# Altium schematic symbol library Vibration_Datalogger.SchLib: 75 symbols (part 2 of 7)
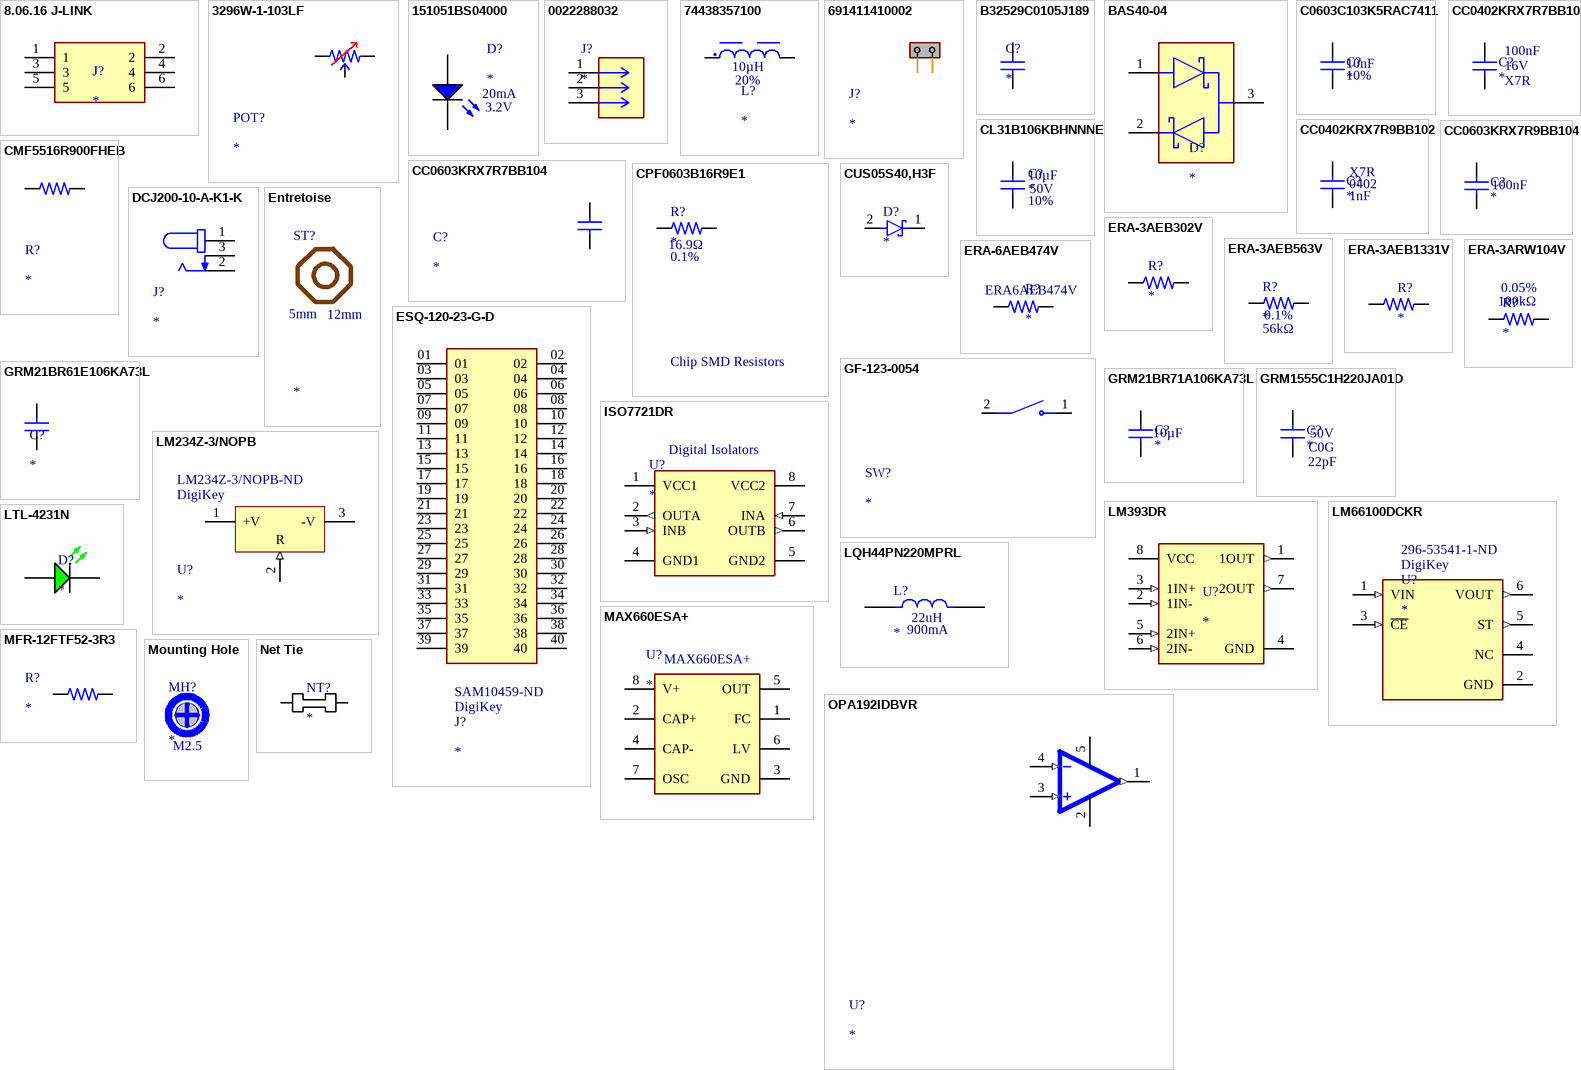
[diagram p2: symbols 8.06.16 J-LINK to OPA192IDBVR]

## CC0603KRX7R7BB104
designator C?
CAP CER 0.1UF 16V X7R 0603; Manufacturer: Yageo Group; Manufacturer Part Number: CC0603KRX7R7BB104; Capacitance: 100nF; Dielectric Material: Ceramic; Insulation Resistance: 100GΩ; Tolerance: 10%; Case/Package: 0603; Case Code (Imperial): 0603; Case Code (Metric): 1608; China RoHS: Compliant; Composition: Ceramic; Depth: 800µm; Dielectric: X7R; Halogen Free: Halogen Free; Height: 800µm; Lead Free: Lead Free; Length: 1.6mm; Lifecycle Status: Production; Material: Ceramic; Max Operating Temperature: 125°C; Min Operating Temperature: -55°C; Mount: Surface Mount; Number of Pins: 2; Number of Terminals: 2; Radiation Hardening: No; REACH SVHC: Yes; Schedule B: 8532240020, 8532240020|8532240020, 8532240020|8532240020|8532240020, 8532240020|8532240020|8532240020|8532240020; Termination: SMD/SMT; Thickness: 889µm; Voltage: 16V; Voltage Rating: 16V; Voltage Rating (DC): 16V; Width: 800µm; ComponentLink1URL: https://datasheet.octopart.com:443/CC0603KRX7R7BB104-Yageo-datasheet-177165144.pdf?src-supplier=IHS; ComponentLink1Description: https://datasheet.octopart.com:443/CC0603KRX7R7BB104-Yageo-datasheet-177165144.pdf?src-supplier=IHS; ComponentLink2URL: https://datasheet.octopart.com:443/CC0603KRX7R7BB104-Yageo-datasheet-82288757.pdf?src-supplier=Upverter; ComponentLink2Description: https://datasheet.octopart.com:443/CC0603KRX7R7BB104-Yageo-datasheet-82288757.pdf?src-supplier=Upverter; ComponentLink3URL: https://datasheet.octopart.com:443/CC0603KRX7R7BB104-Yageo-Group-datasheet-189192896.pdf?src-supplier=Future+Electronics; ComponentLink3Description: https://datasheet.octopart.com:443/CC0603KRX7R7BB104-Yageo-Group-datasheet-189192896.pdf?src-supplier=Future+Electronics; ComponentLink4URL: https://datasheet.octopart.com:443/CC0603KRX7R7BB104-Yageo-datasheet-166511530.pdf?src-supplier=Future+Electronics; ComponentLink4Description: https://datasheet.octopart.com:443/CC0603KRX7R7BB104-Yageo-datasheet-166511530.pdf?src-supplier=Future+Electronics; ComponentLink5URL: https://datasheet.octopart.com:443/CC0603KRX7R7BB104-Yageo-datasheet-137700082.pdf?src-supplier=Future+Electronics; ComponentLink5Description: https://datasheet.octopart.com:443/CC0603KRX7R7BB104-Yageo-datasheet-137700082.pdf?src-supplier=Future+Electronics; ComponentLink6URL: https://datasheet.octopart.com:443/CC0603KRX7R7BB104-Yageo-datasheet-137700084.pdf?src-supplier=Future+Electronics; ComponentLink6Description: https://datasheet.octopart.com:443/CC0603KRX7R7BB104-Yageo-datasheet-137700084.pdf?src-supplier=Future+Electronics; ComponentLink7URL: https://datasheet.octopart.com:443/CC0603KRX7R7BB104-Yageo-datasheet-27626582.pdf?src-supplier=Future+Electronics; ComponentLink7Description: https://datasheet.octopart.com:443/CC0603KRX7R7BB104-Yageo-datasheet-27626582.pdf?src-supplier=Future+Electronics; ComponentLink8URL: https://datasheet.octopart.com:443/CC0603KRX7R7BB104-Yageo-datasheet-12526321.pdf?src-supplier=Future+Electronics; ComponentLink8Description: https://datasheet.octopart.com:443/CC0603KRX7R7BB104-Yageo-datasheet-12526321.pdf?src-supplier=Future+Electronics; ComponentLink9URL: https://datasheet.octopart.com:443/CC0603KRX7R7BB104-Yageo-datasheet-10911834.pdf?src-supplier=Future+Electronics; ComponentLink9Description: https://datasheet.octopart.com:443/CC0603KRX7R7BB104-Yageo-datasheet-10911834.pdf?src-supplier=Future+Electronics; ComponentLink10URL: https://datasheet.octopart.com:443/CC0603KRX7R7BB104-Yageo-datasheet-8324442.pdf?src-supplier=Future+Electronics; ComponentLink10Description: https://datasheet.octopart.com:443/CC0603KRX7R7BB104-Yageo-datasheet-8324442.pdf?src-supplier=Future+Electronics; ComponentLink11URL: https://datasheet.octopart.com/CC0603KRX7R7BB104-Yageo-datasheet-10883670.pdf; ComponentLink11Description: https://datasheet.octopart.com/CC0603KRX7R7BB104-Yageo-datasheet-10883670.pdf; ComponentLink12URL: https://datasheet.octopart.com:443/CC0603KRX7R7BB104-Yageo-datasheet-181968638.pdf?src-supplier=Newark; ComponentLink12Description: https://datasheet.octopart.com:443/CC0603KRX7R7BB104-Yageo-datasheet-181968638.pdf?src-supplier=Newark; ComponentLink13URL: https://datasheet.octopart.com:443/CC0603KRX7R7BB104-Phycomp-datasheet-499490.pdf?src-supplier=Newark; ComponentLink13Description: https://datasheet.octopart.com:443/CC0603KRX7R7BB104-Phycomp-datasheet-499490.pdf?src-supplier=Newark; ComponentLink14URL: https://datasheet.octopart.com:443/CC0603KRX7R7BB104-Yageo-datasheet-62336348.pdf?src-supplier=Newark; ComponentLink14Description: https://datasheet.octopart.com:443/CC0603KRX7R7BB104-Yageo-datasheet-62336348.pdf?src-supplier=Newark; ComponentLink15URL: https://datasheet.octopart.com:443/CC0603KRX7R7BB104-Yageo-datasheet-15895757.pdf?src-supplier=Newark; ComponentLink15Description: https://datasheet.octopart.com:443/CC0603KRX7R7BB104-Yageo-datasheet-15895757.pdf?src-supplier=Newark; ComponentLink16URL: https://datasheet.octopart.com:443/CC0603KRX7R7BB104-Yageo-datasheet-182050803.pdf?src-supplier=Newark; ComponentLink16Description: https://datasheet.octopart.com:443/CC0603KRX7R7BB104-Yageo-datasheet-182050803.pdf?src-supplier=Newark; ComponentLink17URL: https://datasheet.octopart.com:443/CC0603KRX7R7BB104-Yageo-datasheet-151948686.pdf?src-supplier=Farnell; ComponentLink17Description: https://datasheet.octopart.com:443/CC0603KRX7R7BB104-Yageo-datasheet-151948686.pdf?src-supplier=Farnell; ComponentLink18URL: https://datasheet.octopart.com:443/CC0603KRX7R7BB104-Phycomp-datasheet-500777.pdf?src-supplier=Farnell; ComponentLink18Description: https://datasheet.octopart.com:443/CC0603KRX7R7BB104-Phycomp-datasheet-500777.pdf?src-supplier=Farnell; ComponentLink19URL: https://datasheet.octopart.com:443/CC0603KRX7R7BB104-Phycomp-datasheet-519481.pdf?src-supplier=element14; ComponentLink19Description: https://datasheet.octopart.com:443/CC0603KRX7R7BB104-Phycomp-datasheet-519481.pdf?src-supplier=element14; ComponentLink20URL: https://datasheet.octopart.com:443/CC0603KRX7R7BB104-Yageo-datasheet-8701427.pdf?src-supplier=element14; ComponentLink20Description: https://datasheet.octopart.com:443/CC0603KRX7R7BB104-Yageo-datasheet-8701427.pdf?src-supplier=element14; ComponentLink21URL: https://datasheet.octopart.com:443/CC0603KRX7R7BB104-Yageo-datasheet-5301394.pdf?src-supplier=element14; ComponentLink21Description: https://datasheet.octopart.com:443/CC0603KRX7R7BB104-Yageo-datasheet-5301394.pdf?src-supplier=element14; ComponentLink22URL: https://datasheet.octopart.com:443/CC0603KRX7R7BB104-Yageo-Group-datasheet-165992755.pdf?src-supplier=ODG+(Origin+Data+Global); ComponentLink22Description: https://datasheet.octopart.com:443/CC0603KRX7R7BB104-Yageo-Group-datasheet-165992755.pdf?src-supplier=ODG+(Origin+Data+Global); ComponentLink23URL: https://datasheet.octopart.com:443/CC0603KRX7R7BB104-Yageo-datasheet-140260305.pdf?src-supplier=SOS+electronic; ComponentLink23Description: https://datasheet.octopart.com:443/CC0603KRX7R7BB104-Yageo-datasheet-140260305.pdf?src-supplier=SOS+electronic; ComponentLink24URL: https://datasheet.octopart.com:443/CC0603KRX7R7BB104-Yageo-datasheet-178018956.pdf?src-supplier=Burklin+Elektronik; ComponentLink24Description: https://datasheet.octopart.com:443/CC0603KRX7R7BB104-Yageo-datasheet-178018956.pdf?src-supplier=Burklin+Elektronik; ComponentLink25URL: https://datasheet.octopart.com:443/CC0603KRX7R7BB104-Yageo-datasheet-17600895.pdf?src-supplier=TME; ComponentLink25Description: https://datasheet.octopart.com:443/CC0603KRX7R7BB104-Yageo-datasheet-17600895.pdf?src-supplier=TME; ComponentLink26URL: https://datasheet.octopart.com:443/CC0603KRX7R7BB104-Yageo-datasheet-118396.pdf?src-supplier=DigiKey; ComponentLink26Description: https://datasheet.octopart.com:443/CC0603KRX7R7BB104-Yageo-datasheet-118396.pdf?src-supplier=DigiKey; ComponentLink27URL: http://sigma.octopart.com:80/conflict_mineral_statement/Yageo-company-3.pdf?src-supplier=Compliance+Statements; ComponentLink27Description: http://sigma.octopart.com:80/conflict_mineral_statement/Yageo-company-3.pdf?src-supplier=Compliance+Statements; ComponentLink28URL: http://sigma.octopart.com:80/rohs_statement/Yageo-company-2.pdf?src-supplier=Compliance+Statements; ComponentLink28Description: http://sigma.octopart.com:80/rohs_statement/Yageo-company-2.pdf?src-supplier=Compliance+Statements; Supplier 1: DigiKey; Supplier Part Number 1: 311-1088-1-ND; Category: Ceramic Capacitors
footprint CC0603KRX7R7BB104 (CAP CER 0.1UF 16V X7R 0603)
pins: 1 P, 2 N

## CC0603KRX7R9BB104
designator C?  Capacitance: 100nF
CAP CER 0.1UF 50V X7R 0603; Dielectric Material: Ceramic; Tolerance: 10%; Case/Package: 0603; Case Code (Imperial): 0603; Case Code (Metric): 1608; China RoHS: Compliant; Country of Origin: Mainland China, Taiwan; Depth: 800µm; Dielectric: X7R; Export Control Classification Number (ECCN) Code: EAR99; Halogen Free: Halogen Free; Height: 800µm; Harmonized Tariff Schedule (HTS) Code: 8532.24.00.20; Introduction Date: 2005-08-18; Lead Free: Lead Free; Length: 1.6mm; Lifecycle Status: Production; Material: Ceramic; Max Operating Temperature: 125°C; Min Operating Temperature: -55°C; Mount: Surface Mount; Number of Pins: 2; Number of Terminals: 2; Radiation Hardening: No; REACH SVHC: Yes; Schedule B: 8532240020, 8532240020|8532240020, 8532240020|8532240020|8532240020, 8532240020|8532240020|8532240020|8532240020; Termination: SMD/SMT; Thickness: 889µm; Voltage: 50V; Voltage Rating: 50V; Voltage Rating (DC): 50V; Width: 800µm; ComponentLink1URL: https://datasheet.octopart.com:443/CC0603KRX7R9BB104-Yageo-datasheet-177165144.pdf?src-supplier=IHS; ComponentLink1Description: https://datasheet.octopart.com:443/CC0603KRX7R9BB104-Yageo-datasheet-177165144.pdf?src-supplier=IHS; ComponentLink2URL: https://datasheet.octopart.com:443/CC0603KRX7R9BB104-Yageo-datasheet-82288757.pdf?src-supplier=Upverter; ComponentLink2Description: https://datasheet.octopart.com:443/CC0603KRX7R9BB104-Yageo-datasheet-82288757.pdf?src-supplier=Upverter; ComponentLink3URL: https://datasheet.octopart.com:443/CC0603KRX7R9BB104-Yageo-datasheet-68298032.pdf?src-supplier=Upverter; ComponentLink3Description: https://datasheet.octopart.com:443/CC0603KRX7R9BB104-Yageo-datasheet-68298032.pdf?src-supplier=Upverter; ComponentLink4URL: https://datasheet.octopart.com:443/CC0603KRX7R9BB104-Yageo-Group-datasheet-189192896.pdf?src-supplier=Future+Electronics; ComponentLink4Description: https://datasheet.octopart.com:443/CC0603KRX7R9BB104-Yageo-Group-datasheet-189192896.pdf?src-supplier=Future+Electronics; ComponentLink5URL: https://datasheet.octopart.com:443/CC0603KRX7R9BB104-Yageo-datasheet-166511530.pdf?src-supplier=Future+Electronics; ComponentLink5Description: https://datasheet.octopart.com:443/CC0603KRX7R9BB104-Yageo-datasheet-166511530.pdf?src-supplier=Future+Electronics; ComponentLink6URL: https://datasheet.octopart.com:443/CC0603KRX7R9BB104-Yageo-datasheet-137700082.pdf?src-supplier=Future+Electronics; ComponentLink6Description: https://datasheet.octopart.com:443/CC0603KRX7R9BB104-Yageo-datasheet-137700082.pdf?src-supplier=Future+Electronics; ComponentLink7URL: https://datasheet.octopart.com:443/CC0603KRX7R9BB104-Yageo-datasheet-137700084.pdf?src-supplier=Future+Electronics; ComponentLink7Description: https://datasheet.octopart.com:443/CC0603KRX7R9BB104-Yageo-datasheet-137700084.pdf?src-supplier=Future+Electronics; ComponentLink8URL: https://datasheet.octopart.com:443/CC0603KRX7R9BB104-Yageo-datasheet-27626582.pdf?src-supplier=Future+Electronics; ComponentLink8Description: https://datasheet.octopart.com:443/CC0603KRX7R9BB104-Yageo-datasheet-27626582.pdf?src-supplier=Future+Electronics; ComponentLink9URL: https://datasheet.octopart.com:443/CC0603KRX7R9BB104-Yageo-datasheet-15895757.pdf?src-supplier=Future+Electronics; ComponentLink9Description: https://datasheet.octopart.com:443/CC0603KRX7R9BB104-Yageo-datasheet-15895757.pdf?src-supplier=Future+Electronics; ComponentLink10URL: https://datasheet.octopart.com:443/CC0603KRX7R9BB104-Yageo-datasheet-8324192.pdf?src-supplier=Future+Electronics; ComponentLink10Description: https://datasheet.octopart.com:443/CC0603KRX7R9BB104-Yageo-datasheet-8324192.pdf?src-supplier=Future+Electronics; ComponentLink11URL: https://datasheet.octopart.com/CC0603KRX7R9BB104-Yageo-datasheet-10883670.pdf; ComponentLink11Description: https://datasheet.octopart.com/CC0603KRX7R9BB104-Yageo-datasheet-10883670.pdf; ComponentLink12URL: https://datasheet.octopart.com/CC0603KRX7R9BB104-Yageo-datasheet-12526321.pdf; ComponentLink12Description: https://datasheet.octopart.com/CC0603KRX7R9BB104-Yageo-datasheet-12526321.pdf; ComponentLink13URL: https://datasheet.octopart.com:443/CC0603KRX7R9BB104-Yageo-datasheet-181968726.pdf?src-supplier=Newark; ComponentLink13Description: https://datasheet.octopart.com:443/CC0603KRX7R9BB104-Yageo-datasheet-181968726.pdf?src-supplier=Newark; ComponentLink14URL: https://datasheet.octopart.com:443/CC0603KRX7R9BB104-Yageo-datasheet-499490.pdf?src-supplier=Newark; ComponentLink14Description: https://datasheet.octopart.com:443/CC0603KRX7R9BB104-Yageo-datasheet-499490.pdf?src-supplier=Newark; ComponentLink15URL: https://datasheet.octopart.com:443/CC0603KRX7R9BB104-Yageo-datasheet-62336348.pdf?src-supplier=Newark; ComponentLink15Description: https://datasheet.octopart.com:443/CC0603KRX7R9BB104-Yageo-datasheet-62336348.pdf?src-supplier=Newark; ComponentLink16URL: https://datasheet.octopart.com:443/CC0603KRX7R9BB104-Yageo-datasheet-147453679.pdf?src-supplier=Newark; ComponentLink16Description: https://datasheet.octopart.com:443/CC0603KRX7R9BB104-Yageo-datasheet-147453679.pdf?src-supplier=Newark; ComponentLink17URL: https://datasheet.octopart.com:443/CC0603KRX7R9BB104-Yageo-datasheet-151948686.pdf?src-supplier=Farnell; ComponentLink17Description: https://datasheet.octopart.com:443/CC0603KRX7R9BB104-Yageo-datasheet-151948686.pdf?src-supplier=Farnell; ComponentLink18URL: https://datasheet.octopart.com:443/CC0603KRX7R9BB104-Yageo-datasheet-500777.pdf?src-supplier=Farnell; ComponentLink18Description: https://datasheet.octopart.com:443/CC0603KRX7R9BB104-Yageo-datasheet-500777.pdf?src-supplier=Farnell; ComponentLink19URL: https://datasheet.octopart.com:443/CC0603KRX7R9BB104-Yageo-datasheet-178019014.pdf?src-supplier=Burklin+Elektronik; ComponentLink19Description: https://datasheet.octopart.com:443/CC0603KRX7R9BB104-Yageo-datasheet-178019014.pdf?src-supplier=Burklin+Elektronik; ComponentLink20URL: https://datasheet.octopart.com:443/CC0603KRX7R9BB104-Yageo-Group-datasheet-165992755.pdf?src-supplier=ODG+(Origin+Data+Global); ComponentLink20Description: https://datasheet.octopart.com:443/CC0603KRX7R9BB104-Yageo-Group-datasheet-165992755.pdf?src-supplier=ODG+(Origin+Data+Global); ComponentLink21URL: https://datasheet.octopart.com:443/CC0603KRX7R9BB104-Yageo-datasheet-140260305.pdf?src-supplier=SOS+electronic; ComponentLink21Description: https://datasheet.octopart.com:443/CC0603KRX7R9BB104-Yageo-datasheet-140260305.pdf?src-supplier=SOS+electronic; ComponentLink22URL: https://datasheet.octopart.com:443/CC0603KRX7R9BB104-Yageo-datasheet-120101875.pdf?src-supplier=Megastar; ComponentLink22Description: https://datasheet.octopart.com:443/CC0603KRX7R9BB104-Yageo-datasheet-120101875.pdf?src-supplier=Megastar; ComponentLink23URL: https://datasheet.octopart.com:443/CC0603KRX7R9BB104-Yageo-datasheet-8701427.pdf?src-supplier=element14; ComponentLink23Description: https://datasheet.octopart.com:443/CC0603KRX7R9BB104-Yageo-datasheet-8701427.pdf?src-supplier=element14; ComponentLink24URL: https://datasheet.octopart.com:443/CC0603KRX7R9BB104-Yageo-datasheet-5301394.pdf?src-supplier=element14; ComponentLink24Description: https://datasheet.octopart.com:443/CC0603KRX7R9BB104-Yageo-datasheet-5301394.pdf?src-supplier=element14; ComponentLink25URL: https://datasheet.octopart.com:443/CC0603KRX7R9BB104-Yageo-datasheet-17600895.pdf?src-supplier=TME; ComponentLink25Description: https://datasheet.octopart.com:443/CC0603KRX7R9BB104-Yageo-datasheet-17600895.pdf?src-supplier=TME; ComponentLink26URL: http://sigma.octopart.com:80/15889575/rohs_statement/Yageo-CC0603KRX7R9BB104.pdf?src-supplier=Compliance+Statements; ComponentLink26Description: http://sigma.octopart.com:80/15889575/rohs_statement/Yageo-CC0603KRX7R9BB104.pdf?src-supplier=Compliance+Statements; ComponentLink27URL: http://sigma.octopart.com:80/rohs_statement/Surface-Mount-Ceramic-Multilayer-Capacitors%3B-General-Purpose-%26-High-Capacitance-Class-2%2C-X7R-Yageo-family-124.pdf?src-supplier=Compliance+Statements; ComponentLink27Description: http://sigma.octopart.com:80/rohs_statement/Surface-Mount-Ceramic-Multilayer-Capacitors%3B-General-Purpose-%26-High-Capacitance-Class-2%2C-X7R-Yageo-family-124.pdf?src-supplier=Compliance+Statements; ComponentLink28URL: http://sigma.octopart.com:80/reach_statement/Surface-Mount-Ceramic-Multilayer-Capacitors%3B-General-Purpose-%26-High-Capacitance-Class-2%2C-X7R-Yageo-family-125.pdf?src-supplier=Compliance+Statements; ComponentLink28Description: http://sigma.octopart.com:80/reach_statement/Surface-Mount-Ceramic-Multilayer-Capacitors%3B-General-Purpose-%26-High-Capacitance-Class-2%2C-X7R-Yageo-family-125.pdf?src-supplier=Compliance+Statements; ComponentLink29URL: http://sigma.octopart.com:80/conflict_mineral_statement/Yageo-company-3.pdf?src-supplier=Compliance+Statements; ComponentLink29Description: http://sigma.octopart.com:80/conflict_mineral_statement/Yageo-company-3.pdf?src-supplier=Compliance+Statements
footprint CC0603KRX7R7BB104 (CAP CER 0.1UF 16V X7R 0603)
pins: 1 P, 2 N

## CL31B106KBHNNNE
designator C?  Capacitance: 10µF  Voltage Rating: 50V  Tolerance: 10%
CAP CER 10UF 50V X7R 1206; Manufacturer: Cal-Chip Electronics; Manufacturer Part Number: GMC31X7R106M35NT; Dielectric Material: Ceramic; Case/Package: 1206; China RoHS: Compliant; Country of Origin: Slovenia, South Korea, Taiwan; Export Control Classification Number (ECCN) Code: EAR99; Height: 1.9mm; Harmonized Tariff Schedule (HTS) Code: 8532.24.00.20; Introduction Date: 2022-02-23; Length: 3.2mm; Lifecycle Status: Production; Max Operating Temperature: 125°C; Min Operating Temperature: -55°C; Mount: Surface Mount; Number of Terminals: 2; REACH SVHC: Yes; Width: 1.6mm; ComponentLink1URL: https://datasheet.octopart.com:443/GMC31X7R106M35NT-Cal-Chip-Electronics-datasheet-182028815.pdf?src-supplier=IHS; ComponentLink1Description: https://datasheet.octopart.com:443/GMC31X7R106M35NT-Cal-Chip-Electronics-datasheet-182028815.pdf?src-supplier=IHS; Supplier 1: DigiKey; Supplier Part Number 1: 4713-GMC31X7R106M35NTCT-ND; Category: Ceramic Capacitors; Case Code (Imperial): 1206; Case Code (Metric): 3216; Dielectric: X7R; Lead Free: Lead Free; Material: Ceramic; Packaging: Tape & Reel (TR); Schedule B: 8532240020, 8532240020|8532240020|8532240020|8532240020|8532240020; Thickness: 1.8034mm; ComponentLink2URL: https://datasheet.octopart.com:443/CL31B106KBHNNNE-Samsung-Electro-Mechanics-datasheet-137256395.pdf?src-supplier=Upverter; ComponentLink2Description: https://datasheet.octopart.com:443/CL31B106KBHNNNE-Samsung-Electro-Mechanics-datasheet-137256395.pdf?src-supplier=Upverter; ComponentLink3URL: https://datasheet.octopart.com:443/CL31B106KBHNNNE-Samsung-Electro-Mechanics-datasheet-149066874.pdf?src-supplier=Future+Electronics; ComponentLink3Description: https://datasheet.octopart.com:443/CL31B106KBHNNNE-Samsung-Electro-Mechanics-datasheet-149066874.pdf?src-supplier=Future+Electronics; ComponentLink4URL: https://datasheet.octopart.com:443/CL31B106KBHNNNE-Samsung-Electro-Mechanics-datasheet-67374631.pdf?src-supplier=Future+Electronics; ComponentLink4Description: https://datasheet.octopart.com:443/CL31B106KBHNNNE-Samsung-Electro-Mechanics-datasheet-67374631.pdf?src-supplier=Future+Electronics; ComponentLink5URL: https://datasheet.octopart.com:443/CL31B106KBHNNNE-Samsung-Electro-Mechanics-datasheet-136482622.pdf?src-supplier=Newark; ComponentLink5Description: https://datasheet.octopart.com:443/CL31B106KBHNNNE-Samsung-Electro-Mechanics-datasheet-136482622.pdf?src-supplier=Newark; ComponentLink6URL: https://datasheet.octopart.com/CL31B106KBHNNNE-Samsung-Electro-Mechanics-datasheet-97040617.pdf; ComponentLink6Description: https://datasheet.octopart.com/CL31B106KBHNNNE-Samsung-Electro-Mechanics-datasheet-97040617.pdf; ComponentLink7URL: https://datasheet.octopart.com/CL31B106KBHNNNE-Samsung-Electro-Mechanics-datasheet-8324245.pdf; ComponentLink7Description: https://datasheet.octopart.com/CL31B106KBHNNNE-Samsung-Electro-Mechanics-datasheet-8324245.pdf; ComponentLink8URL: https://datasheet.octopart.com:443/CL31B106KBHNNNE-Samsung-Electro-Mechanics-datasheet-110617700.pdf?src-supplier=LCSC; ComponentLink8Description: https://datasheet.octopart.com:443/CL31B106KBHNNNE-Samsung-Electro-Mechanics-datasheet-110617700.pdf?src-supplier=LCSC; ComponentLink9URL: https://datasheet.octopart.com:443/CL31B106KBHNNNE-Samsung-datasheet-59220082.pdf?src-supplier=TME; ComponentLink9Description: https://datasheet.octopart.com:443/CL31B106KBHNNNE-Samsung-datasheet-59220082.pdf?src-supplier=TME
footprint CL31B106KBHNNNE (CAP CER 10UF 50V X7R 1206)
pins: 1 P, 2 N

## CMF5516R900FHEB
designator R?
RES 16.9 OHM 1/2W 1% AXIAL; Lead Diameter: 600µm; Max Power Dissipation: 500mW; Resistance: 16.9Ω; Temperature Coefficient: 50ppm/°C; Voltage Rating (DC): 250V; Case/Package: Axial; China RoHS: Compliant; Composition: Metal Film; Contact Plating: Tin; Diameter: 2.29mm; Export Control Classification Number (ECCN) Code: EAR99; Features: Flame Retardant Coating, Moisture Resistant; Harmonized Tariff Schedule (HTS) Code: 8533.21.00.90; Introduction Date: 2005-12-02; Lead Free: Lead Free; Lifecycle Status: Production; Max Operating Temperature: 155°C; Min Operating Temperature: -55°C; Mount: Through Hole; Number of Terminals: 2; Number of Terminations: 2; Power Dissipation: 500mW; Radiation Hardening: No; REACH SVHC: No; Tolerance: 1%; Working Voltage: 250V; ComponentLink1URL: https://datasheet.octopart.com:443/CMF5516R900FHEB-Vishay-datasheet-154547024.pdf?src-supplier=IHS; ComponentLink1Description: https://datasheet.octopart.com:443/CMF5516R900FHEB-Vishay-datasheet-154547024.pdf?src-supplier=IHS; ComponentLink2URL: https://datasheet.octopart.com/Metal-Film-Resistors%2C-Industrial%2C-Precision-Vishay-datasheet-family-218.pdf; ComponentLink2Description: https://datasheet.octopart.com/Metal-Film-Resistors%2C-Industrial%2C-Precision-Vishay-datasheet-family-218.pdf; ComponentLink3URL: https://datasheet.octopart.com/CMF5516R900FHEB-Vishay-datasheet-13468232.pdf; ComponentLink3Description: https://datasheet.octopart.com/CMF5516R900FHEB-Vishay-datasheet-13468232.pdf; ComponentLink4URL: https://datasheet.octopart.com/CMF5516R900FHEB-Vishay-datasheet-13246561.pdf; ComponentLink4Description: https://datasheet.octopart.com/CMF5516R900FHEB-Vishay-datasheet-13246561.pdf; ComponentLink5URL: https://datasheet.octopart.com/CMF5516R900FHEB-Vishay-datasheet-13175251.pdf; ComponentLink5Description: https://datasheet.octopart.com/CMF5516R900FHEB-Vishay-datasheet-13175251.pdf; ComponentLink6URL: https://datasheet.octopart.com/CMF5516R900FHEB-Vishay-datasheet-13095865.pdf; ComponentLink6Description: https://datasheet.octopart.com/CMF5516R900FHEB-Vishay-datasheet-13095865.pdf; ComponentLink7URL: https://datasheet.octopart.com/CMF5516R900FHEB-Vishay-datasheet-13068938.pdf; ComponentLink7Description: https://datasheet.octopart.com/CMF5516R900FHEB-Vishay-datasheet-13068938.pdf; ComponentLink8URL: https://datasheet.octopart.com/CMF5516R900FHEB-Vishay-datasheet-12544280.pdf; ComponentLink8Description: https://datasheet.octopart.com/CMF5516R900FHEB-Vishay-datasheet-12544280.pdf; ComponentLink9URL: https://datasheet.octopart.com/CMF5516R900FHEB-Vishay-datasheet-12531457.pdf; ComponentLink9Description: https://datasheet.octopart.com/CMF5516R900FHEB-Vishay-datasheet-12531457.pdf; ComponentLink10URL: https://datasheet.octopart.com/CMF5516R900FHEB-Vishay-datasheet-12518810.pdf; ComponentLink10Description: https://datasheet.octopart.com/CMF5516R900FHEB-Vishay-datasheet-12518810.pdf; ComponentLink11URL: https://datasheet.octopart.com/CMF5516R900FHEB-Vishay-datasheet-12509809.pdf; ComponentLink11Description: https://datasheet.octopart.com/CMF5516R900FHEB-Vishay-datasheet-12509809.pdf; ComponentLink12URL: https://datasheet.octopart.com/CMF5516R900FHEB-Vishay-datasheet-10294430.pdf; ComponentLink12Description: https://datasheet.octopart.com/CMF5516R900FHEB-Vishay-datasheet-10294430.pdf; ComponentLink13URL: https://datasheet.octopart.com/CMF5516R900FHEB-Vishay-datasheet-10185998.pdf; ComponentLink13Description: https://datasheet.octopart.com/CMF5516R900FHEB-Vishay-datasheet-10185998.pdf; ComponentLink14URL: https://datasheet.octopart.com/CMF5516R900FHEB-Vishay-datasheet-10074411.pdf; ComponentLink14Description: https://datasheet.octopart.com/CMF5516R900FHEB-Vishay-datasheet-10074411.pdf; ComponentLink15URL: https://datasheet.octopart.com/CMF5516R900FHEB-Vishay-datasheet-8838559.pdf; ComponentLink15Description: https://datasheet.octopart.com/CMF5516R900FHEB-Vishay-datasheet-8838559.pdf; ComponentLink16URL: https://datasheet.octopart.com/CMF5516R900FHEB-Vishay-datasheet-8363401.pdf; ComponentLink16Description: https://datasheet.octopart.com/CMF5516R900FHEB-Vishay-datasheet-8363401.pdf; ComponentLink17URL: https://datasheet.octopart.com/CMF5516R900FHEB-Vishay-datasheet-5314864.pdf; ComponentLink17Description: https://datasheet.octopart.com/CMF5516R900FHEB-Vishay-datasheet-5314864.pdf; ComponentLink18URL: http://sigma.octopart.com:80/rohs_statement/Vishay-company-15.pdf?src-supplier=Compliance+Statements; ComponentLink18Description: http://sigma.octopart.com:80/rohs_statement/Vishay-company-15.pdf?src-supplier=Compliance+Statements
footprint CMF5516R900FHEB (RES 16.9 OHM 1/2W 1% AXIAL)
pins: 1, 2

## CPF0603B16R9E1
designator R?  Tolerance: 0.1%  Resistance: 16.9Ω  Category: Chip SMD Resistors
CMS CPF 0603 16R9 0.1% 25PPM; Manufacturer Lifecycle Status: ACTIVE; Manufacturer: TE Connectivity; Manufacturer Part Number: CPF0603B16R9E1; Max Power Dissipation: 63mW; Number of Resistors: 1; Operating Supply Voltage: 50V; Temperature Coefficient: 25ppm/°C; Case/Package: 0603; Case Code (Imperial): 0603; Case Code (Metric): 1608; China RoHS: Compliant; Composition: Thin Film; Contact Plating: Tin; Export Control Classification Number (ECCN) Code: EAR99; ELV: Compliant; Height: 450µm; Harmonized Tariff Schedule (HTS) Code: 8533.21.00.30; Introduction Date: 2009-09-23; Length: 1.55mm; Lifecycle Status: Production; Max Operating Temperature: 155°C; Min Operating Temperature: -55°C; Mount: Surface Mount; Number of Terminals: 2; Number of Terminations: 2; Power Rating: 63mW; Radiation Hardening: No; REACH SVHC: Yes; Termination: Solder; Voltage Rating: 50V; Voltage Rating (DC): 50V; Weight: 2.012816mg; Width: 800µm; Working Voltage: 50V; ComponentLink1URL: https://datasheet.octopart.com:443/CPF0603B16R9E1-TE-Connectivity-datasheet-158231717.pdf?src-supplier=IHS; ComponentLink1Description: https://datasheet.octopart.com:443/CPF0603B16R9E1-TE-Connectivity-datasheet-158231717.pdf?src-supplier=IHS; ComponentLink2URL: https://datasheet.octopart.com:443/CPF0603B16R9E1-TE-Connectivity-datasheet-136771900.pdf?src-supplier=Electro+Sonic; ComponentLink2Description: https://datasheet.octopart.com:443/CPF0603B16R9E1-TE-Connectivity-datasheet-136771900.pdf?src-supplier=Electro+Sonic; ComponentLink3URL: https://datasheet.octopart.com:443/CPF0603B16R9E1-TE-Connectivity-datasheet-78339038.pdf?src-supplier=Newark; ComponentLink3Description: https://datasheet.octopart.com:443/CPF0603B16R9E1-TE-Connectivity-datasheet-78339038.pdf?src-supplier=Newark; ComponentLink4URL: https://datasheet.octopart.com:443/CPF0603B16R9E1-TE-Connectivity-datasheet-62056503.pdf?src-supplier=Newark; ComponentLink4Description: https://datasheet.octopart.com:443/CPF0603B16R9E1-TE-Connectivity-datasheet-62056503.pdf?src-supplier=Newark; ComponentLink5URL: https://datasheet.octopart.com:443/CPF0603B16R9E1-TE-Connectivity-datasheet-11120284.pdf?src-supplier=TE+Connectivity; ComponentLink5Description: https://datasheet.octopart.com:443/CPF0603B16R9E1-TE-Connectivity-datasheet-11120284.pdf?src-supplier=TE+Connectivity; ComponentLink6URL: https://datasheet.octopart.com:443/CPF0603B16R9E1-Tyco-Electronics-datasheet-11120060.pdf?src-supplier=TE+Connectivity; ComponentLink6Description: https://datasheet.octopart.com:443/CPF0603B16R9E1-Tyco-Electronics-datasheet-11120060.pdf?src-supplier=TE+Connectivity; ComponentLink7URL: https://sigma.octopart.com:443/78339064/technical_drawing/TE-Connectivity-CPF0603B16R9E1.pdf?src-supplier=TE+Connectivity; ComponentLink7Description: https://sigma.octopart.com:443/78339064/technical_drawing/TE-Connectivity-CPF0603B16R9E1.pdf?src-supplier=TE+Connectivity; ComponentLink8URL: https://datasheet.octopart.com:443/CPF0603B16R9E1-TE-Connectivity-datasheet-11120073.pdf?src-supplier=TE+Connectivity; ComponentLink8Description: https://datasheet.octopart.com:443/CPF0603B16R9E1-TE-Connectivity-datasheet-11120073.pdf?src-supplier=TE+Connectivity; ComponentLink9URL: https://sigma.octopart.com:443/14691678/technical_drawing/TE-Connectivity-CPF0603B16R9E1.pdf?src-supplier=TE+Connectivity; ComponentLink9Description: https://sigma.octopart.com:443/14691678/technical_drawing/TE-Connectivity-CPF0603B16R9E1.pdf?src-supplier=TE+Connectivity; ComponentLink10URL: https://datasheet.octopart.com:443/CPF0603B16R9E1-Neohm-datasheet-140860410.pdf?src-supplier=Master+Electronics; ComponentLink10Description: https://datasheet.octopart.com:443/CPF0603B16R9E1-Neohm-datasheet-140860410.pdf?src-supplier=Master+Electronics; ComponentLink11URL: https://datasheet.octopart.com:443/CPF0603B16R9E1-TE-Connectivity-datasheet-66077623.pdf?src-supplier=Farnell; ComponentLink11Description: https://datasheet.octopart.com:443/CPF0603B16R9E1-TE-Connectivity-datasheet-66077623.pdf?src-supplier=Farnell; ComponentLink12URL: https://datasheet.octopart.com:443/CPF0603B16R9E1-TE-Connectivity-datasheet-11121106.pdf?src-supplier=Farnell; ComponentLink12Description: https://datasheet.octopart.com:443/CPF0603B16R9E1-TE-Connectivity-datasheet-11121106.pdf?src-supplier=Farnell; ComponentLink13URL: https://datasheet.octopart.com:443/CPF0603B16R9E1-TE-Connectivity-datasheet-16487054.pdf?src-supplier=Farnell; ComponentLink13Description: https://datasheet.octopart.com:443/CPF0603B16R9E1-TE-Connectivity-datasheet-16487054.pdf?src-supplier=Farnell; ComponentLink14URL: http://sigma.octopart.com:80/14692461/rohs_certificate/TE-Connectivity-CPF0603B16R9E1.pdf?src-supplier=Compliance+Statements; ComponentLink14Description: http://sigma.octopart.com:80/14692461/rohs_certificate/TE-Connectivity-CPF0603B16R9E1.pdf?src-supplier=Compliance+Statements; Supplier 1: DigiKey; Supplier Part Number 1: CPF0603B16R9E1-ND
footprint CPF0603B16R9E1 (CMS CPF 0603 16R9 0.1% 25PPM)
pins: 1, 2

## CUS05S40,H3F
designator D?
DIODE SCHOTTKY 40V 500MA USC
footprint CUS05S40,H3F (DIODE SCHOTTKY 40V 500MA USC)
pins: 1 C, 2 A

## DCJ200-10-A-K1-K
designator J?
DC POWER JACK, THRU HOLE, HORIZO; Current Rating: 5A; Gender: Male; Voltage Rating: 20V; China RoHS: Compliant; Lifecycle Status: Production; Max Operating Temperature: 70°C; Min Operating Temperature: -20°C; REACH SVHC: Yes; Termination: Through Hole; Voltage Rating (DC): 20V; ComponentLink1URL: https://datasheet.octopart.com:443/DCJ200-10-A-K1-K-Global-Connector-Technology-datasheet-182379671.pdf?src-supplier=TME; ComponentLink1Description: https://datasheet.octopart.com:443/DCJ200-10-A-K1-K-Global-Connector-Technology-datasheet-182379671.pdf?src-supplier=TME; ComponentLink2URL: https://datasheet.octopart.com:443/DCJ200-10-A-K1-K-Global-Connector-Technology-datasheet-91940686.pdf?src-supplier=Newark; ComponentLink2Description: https://datasheet.octopart.com:443/DCJ200-10-A-K1-K-Global-Connector-Technology-datasheet-91940686.pdf?src-supplier=Newark; ComponentLink3URL: https://datasheet.octopart.com:443/DCJ200-10-A-K1-K-Global-Connector-Technology-datasheet-62069292.pdf?src-supplier=Newark; ComponentLink3Description: https://datasheet.octopart.com:443/DCJ200-10-A-K1-K-Global-Connector-Technology-datasheet-62069292.pdf?src-supplier=Newark; ComponentLink4URL: https://datasheet.octopart.com:443/DCJ200-10-A-K1-K-Global-Connector-Technology-datasheet-77992270.pdf?src-supplier=Future+Electronics; ComponentLink4Description: https://datasheet.octopart.com:443/DCJ200-10-A-K1-K-Global-Connector-Technology-datasheet-77992270.pdf?src-supplier=Future+Electronics
footprint DCJ200-10-A-K1-K (DC POWER JACK, THRU HOLE, HORIZO)
pins: 1, 2, 3

## Entretoise
designator ST?  Width: 5mm  Length: 12mm  (mechanical)
HEX STANDOFF M2.5 BRASS 12MM; Manufacturer Lifecycle Status: ACTIVE; Manufacturer: Wurth Elektronik; Manufacturer Part Number: 970120154; YEOL: 1 = Estimated lifetime > 10 years; Lifecycle Status: Production; Material: Brass; Max Operating Temperature: 150°C; Min Operating Temperature: -55°C; Packaging: Carton; REACH SVHC: No; ComponentLink1URL: https://datasheet.octopart.com:443/970120154-Wurth-Elektronik-datasheet-168513000.pdf?src-supplier=RS+(Formerly+Allied+Electronics); ComponentLink1Description: https://datasheet.octopart.com:443/970120154-Wurth-Elektronik-datasheet-168513000.pdf?src-supplier=RS+(Formerly+Allied+Electronics); ComponentLink2URL: https://datasheet.octopart.com:443/970120154-W%C3%BCrth-Elektronik-datasheet-149527616.pdf?src-supplier=Farnell; ComponentLink2Description: https://datasheet.octopart.com:443/970120154-W%C3%BCrth-Elektronik-datasheet-149527616.pdf?src-supplier=Farnell; Supplier 1: DigiKey; Supplier Part Number 1: 732-12851-ND; Category: Spacers, Standoffs
footprint 970120154 (HEX STANDOFF M2.5 BRASS 12MM)

## ERA-3AEB302V
designator R?
RES SMD 3K OHM 0.1% 1/10W 0603; Manufacturer Lifecycle Status: ACTIVE; Part Series: Thin Film Chip Resistors, High Reliability Type; Manufacturer: Panasonic; Manufacturer Part Number: ERA3AEB302V; Max Power Dissipation: 100mW; Resistance: 3kΩ; Temperature Coefficient: 25ppm/°C; Voltage Rating: 75V; Case/Package: 0603; Case Code (Imperial): 0603; Composition: Thin Film; Contact Plating: Tin; Country of Origin: Japan; Depth: 800µm; Export Control Classification Number (ECCN) Code: EAR99; Features: Automotive AEC-Q200; Height: 450µm; Harmonized Tariff Schedule (HTS) Code: 8533.21.00.30; Introduction Date: 2008-03-19; Lead Free: Lead Free; Length: 1.6mm; Lifecycle Status: Production; Max Operating Temperature: 155°C; Military Standard: Not; Min Operating Temperature: -55°C; Mount: Surface Mount; Number of Pins: 2; Number of Terminals: 2; Number of Terminations: 2; Packaging: Cut Tape; Power Rating: 100mW; Radiation Hardening: No; Ratings: AEC-Q200; REACH SVHC: Yes; Schedule B: 8533210045, 8533210045|8533210045|8533210045|8533210045|8533210045|8533210045|8533210045|8533210045|8533210045|8533210045|8533210045|8533210045|8533210045|8533210045|8533210045|8533210045|8533210045|8533210045|8533210045|8533210045|8533210045|8533210045|8533210045|85; Termination: SMD/SMT; Tolerance: 0.1%; Voltage Rating (DC): 75V; Width: 800µm; Working Voltage: 75V; ComponentLink1URL: https://datasheet.octopart.com:443/ERA3AEB302V-Panasonic-datasheet-62287448.pdf?src-supplier=Newark; ComponentLink1Description: https://datasheet.octopart.com:443/ERA3AEB302V-Panasonic-datasheet-62287448.pdf?src-supplier=Newark; ComponentLink2URL: https://datasheet.octopart.com:443/ERA3AEB302V-Panasonic-datasheet-136531316.pdf?src-supplier=Newark; ComponentLink2Description: https://datasheet.octopart.com:443/ERA3AEB302V-Panasonic-datasheet-136531316.pdf?src-supplier=Newark; ComponentLink3URL: https://datasheet.octopart.com:443/ERA3AEB302V-Panasonic-datasheet-8367715.pdf?src-supplier=Newark; ComponentLink3Description: https://datasheet.octopart.com:443/ERA3AEB302V-Panasonic-datasheet-8367715.pdf?src-supplier=Newark; ComponentLink4URL: https://datasheet.octopart.com:443/ERA-3AEB302V-Panasonic-datasheet-61114971.pdf?src-supplier=Newark; ComponentLink4Description: https://datasheet.octopart.com:443/ERA-3AEB302V-Panasonic-datasheet-61114971.pdf?src-supplier=Newark; ComponentLink5URL: https://datasheet.octopart.com:443/ERA3AEB302V-Panasonic-datasheet-181959660.pdf?src-supplier=IHS; ComponentLink5Description: https://datasheet.octopart.com:443/ERA3AEB302V-Panasonic-datasheet-181959660.pdf?src-supplier=IHS; ComponentLink6URL: https://sigma.octopart.com:443/138766958/technical_drawing/Panasonic-ERA3AEB302V.pdf?src-supplier=Upverter; ComponentLink6Description: https://sigma.octopart.com:443/138766958/technical_drawing/Panasonic-ERA3AEB302V.pdf?src-supplier=Upverter; ComponentLink7URL: https://datasheet.octopart.com:443/ERA-3AEB302V-Panasonic-datasheet-118567.pdf?src-supplier=element14; ComponentLink7Description: https://datasheet.octopart.com:443/ERA-3AEB302V-Panasonic-datasheet-118567.pdf?src-supplier=element14; ComponentLink8URL: https://datasheet.octopart.com:443/ERA-3AEB302V-Panasonic-datasheet-13266200.pdf?src-supplier=Future+Electronics; ComponentLink8Description: https://datasheet.octopart.com:443/ERA-3AEB302V-Panasonic-datasheet-13266200.pdf?src-supplier=Future+Electronics; ComponentLink9URL: https://datasheet.octopart.com:443/ERA-3AEB302V-Panasonic-datasheet-12510007.pdf?src-supplier=Future+Electronics; ComponentLink9Description: https://datasheet.octopart.com:443/ERA-3AEB302V-Panasonic-datasheet-12510007.pdf?src-supplier=Future+Electronics; ComponentLink10URL: https://datasheet.octopart.com:443/ERA-3AEB302V-Panasonic-datasheet-11763931.pdf?src-supplier=Future+Electronics; ComponentLink10Description: https://datasheet.octopart.com:443/ERA-3AEB302V-Panasonic-datasheet-11763931.pdf?src-supplier=Future+Electronics; ComponentLink11URL: https://datasheet.octopart.com:443/ERA-3AEB302V-Panasonic-datasheet-10840895.pdf?src-supplier=Future+Electronics; ComponentLink11Description: https://datasheet.octopart.com:443/ERA-3AEB302V-Panasonic-datasheet-10840895.pdf?src-supplier=Future+Electronics; ComponentLink12URL: https://datasheet.octopart.com:443/ERA-3AEB302V-Panasonic-datasheet-5392808.pdf?src-supplier=Future+Electronics; ComponentLink12Description: https://datasheet.octopart.com:443/ERA-3AEB302V-Panasonic-datasheet-5392808.pdf?src-supplier=Future+Electronics; ComponentLink13URL: https://datasheet.octopart.com:443/ERA-3AEB302V-Panasonic-datasheet-154766165.pdf?src-supplier=Master+Electronics; ComponentLink13Description: https://datasheet.octopart.com:443/ERA-3AEB302V-Panasonic-datasheet-154766165.pdf?src-supplier=Master+Electronics; ComponentLink14URL: https://datasheet.octopart.com:443/ERA-3AEB302V-Panasonic-datasheet-46744048.pdf?src-supplier=RS+(Formerly+Allied+Electronics); ComponentLink14Description: https://datasheet.octopart.com:443/ERA-3AEB302V-Panasonic-datasheet-46744048.pdf?src-supplier=RS+(Formerly+Allied+Electronics); ComponentLink15URL: https://datasheet.octopart.com:443/ERA-3AEB302V-Panasonic-datasheet-184398012.pdf?src-supplier=JRH+Electronics; ComponentLink15Description: https://datasheet.octopart.com:443/ERA-3AEB302V-Panasonic-datasheet-184398012.pdf?src-supplier=JRH+Electronics; ComponentLink16URL: https://datasheet.octopart.com:443/ERA3AEB302V-Panasonic-datasheet-188913046.pdf?src-supplier=TME; ComponentLink16Description: https://datasheet.octopart.com:443/ERA3AEB302V-Panasonic-datasheet-188913046.pdf?src-supplier=TME; ComponentLink17URL: https://sigma.octopart.com:443/150570796/technical_drawing/Panasonic-ERA3AEB302V.pdf?src-supplier=Panasonic+SCT; ComponentLink17Description: https://sigma.octopart.com:443/150570796/technical_drawing/Panasonic-ERA3AEB302V.pdf?src-supplier=Panasonic+SCT; ComponentLink18URL: https://datasheet.octopart.com:443/ERA3AEB302V-Panasonic-datasheet-138783076.pdf?src-supplier=Burklin+Elektronik; ComponentLink18Description: https://datasheet.octopart.com:443/ERA3AEB302V-Panasonic-datasheet-138783076.pdf?src-supplier=Burklin+Elektronik; ComponentLink19URL: https://datasheet.octopart.com/ERA3AEB302V-Panasonic-datasheet-78375410.pdf; ComponentLink19Description: https://datasheet.octopart.com/ERA3AEB302V-Panasonic-datasheet-78375410.pdf; ComponentLink20URL: https://datasheet.octopart.com:443/ERA3AEB302V-Panasonic---ECG-datasheet-15994758.pdf?src-supplier=Farnell; ComponentLink20Description: https://datasheet.octopart.com:443/ERA3AEB302V-Panasonic---ECG-datasheet-15994758.pdf?src-supplier=Farnell; ComponentLink21URL: https://datasheet.octopart.com:443/ERA-3AEB302V-Panasonic-datasheet-33006989.pdf?src-supplier=Electro+Sonic; ComponentLink21Description: https://datasheet.octopart.com:443/ERA-3AEB302V-Panasonic-datasheet-33006989.pdf?src-supplier=Electro+Sonic; Supplier 1: DigiKey; Supplier Part Number 1: P3.0KDBCT-ND; Category: Chip SMD Resistors
footprint ERA-3AEB302V (RES SMD 3K OHM 0.1% 1/10W 0603)
pins: 1, 2

## ERA-3AEB563V
designator R?  Tolerance: 0.1%  Resistance: 56kΩ
Res Thin Film 0603 56K Ohm 0.1% 0.1W ±25ppm/°C Molded SMD Punched Carrier T/R; Manufacturer Lifecycle Status: ACTIVE; Part Series: Thin Film Chip Resistors, High Reliability Type; Manufacturer: Panasonic; Manufacturer Part Number: ERA-3AEB563V; Max Power Dissipation: 100mW; Voltage Rating: 75V; Case/Package: 0603; Case Code (Imperial): 0603; Composition: Thin Film; Contact Plating: Tin; Depth: 800µm; Features: Automotive AEC-Q200; Height: 450µm; Lead Free: Lead Free; Length: 1.6mm; Lifecycle Status: Production; Max Operating Temperature: 155°C; Military Standard: Not; Min Operating Temperature: -55°C; Mount: Surface Mount; Number of Pins: 2; Number of Terminals: 2; Number of Terminations: 2; Packaging: Tape & Reel; Power Dissipation: 100mW; Power Rating: 100mW; Radiation Hardening: No; REACH SVHC: Yes; Schedule B: 8533210045, 8533210045|8533210045|8533210045|8533210045|8533210045; Temperature Coefficient: 25ppm/°C; Termination: SMD/SMT; Voltage Rating (DC): 75V; Width: 800µm; Working Voltage: 75V; ComponentLink1URL: https://datasheet.octopart.com:443/ERA-3AEB563V-Panasonic-datasheet-62287448.pdf?src-supplier=Panasonic; ComponentLink1Description: https://datasheet.octopart.com:443/ERA-3AEB563V-Panasonic-datasheet-62287448.pdf?src-supplier=Panasonic; ComponentLink2URL: https://datasheet.octopart.com:443/ERA-3AEB563V-Panasonic-datasheet-136531316.pdf?src-supplier=Newark; ComponentLink2Description: https://datasheet.octopart.com:443/ERA-3AEB563V-Panasonic-datasheet-136531316.pdf?src-supplier=Newark; ComponentLink3URL: https://datasheet.octopart.com:443/ERA-3AEB563V-Panasonic-datasheet-8367715.pdf?src-supplier=Newark; ComponentLink3Description: https://datasheet.octopart.com:443/ERA-3AEB563V-Panasonic-datasheet-8367715.pdf?src-supplier=Newark; ComponentLink4URL: https://datasheet.octopart.com:443/ERA-3AEB563V-Panasonic-datasheet-61114971.pdf?src-supplier=Newark; ComponentLink4Description: https://datasheet.octopart.com:443/ERA-3AEB563V-Panasonic-datasheet-61114971.pdf?src-supplier=Newark; ComponentLink5URL: https://datasheet.octopart.com:443/ERA-3AEB563V-Panasonic-datasheet-118567.pdf?src-supplier=element14; ComponentLink5Description: https://datasheet.octopart.com:443/ERA-3AEB563V-Panasonic-datasheet-118567.pdf?src-supplier=element14; ComponentLink6URL: https://datasheet.octopart.com:443/ERA-3AEB563V-Panasonic-datasheet-13266200.pdf?src-supplier=_legacy+Avnet; ComponentLink6Description: https://datasheet.octopart.com:443/ERA-3AEB563V-Panasonic-datasheet-13266200.pdf?src-supplier=_legacy+Avnet; ComponentLink7URL: https://datasheet.octopart.com:443/ERA3AEB563V-Panasonic-datasheet-10840895.pdf?src-supplier=_legacy+Avnet; ComponentLink7Description: https://datasheet.octopart.com:443/ERA3AEB563V-Panasonic-datasheet-10840895.pdf?src-supplier=_legacy+Avnet; ComponentLink8URL: https://datasheet.octopart.com:443/ERA3AEB563V-Panasonic-datasheet-12510007.pdf?src-supplier=_legacy+Avnet; ComponentLink8Description: https://datasheet.octopart.com:443/ERA3AEB563V-Panasonic-datasheet-12510007.pdf?src-supplier=_legacy+Avnet; ComponentLink9URL: https://datasheet.octopart.com:443/ERA3AEB563V-Panasonic-datasheet-11763931.pdf?src-supplier=_legacy+Avnet; ComponentLink9Description: https://datasheet.octopart.com:443/ERA3AEB563V-Panasonic-datasheet-11763931.pdf?src-supplier=_legacy+Avnet; ComponentLink10URL: https://datasheet.octopart.com:443/ERA3AEB563V-Panasonic-datasheet-5392808.pdf?src-supplier=_legacy+Avnet; ComponentLink10Description: https://datasheet.octopart.com:443/ERA3AEB563V-Panasonic-datasheet-5392808.pdf?src-supplier=_legacy+Avnet; ComponentLink11URL: https://datasheet.octopart.com:443/ERA-3AEB563V-Panasonic-datasheet-154766165.pdf?src-supplier=Master+Electronics; ComponentLink11Description: https://datasheet.octopart.com:443/ERA-3AEB563V-Panasonic-datasheet-154766165.pdf?src-supplier=Master+Electronics; ComponentLink12URL: https://datasheet.octopart.com:443/ERA-3AEB563V-Panasonic-datasheet-46744048.pdf?src-supplier=RS+(Formerly+Allied+Electronics); ComponentLink12Description: https://datasheet.octopart.com:443/ERA-3AEB563V-Panasonic-datasheet-46744048.pdf?src-supplier=RS+(Formerly+Allied+Electronics); ComponentLink13URL: https://datasheet.octopart.com:443/ERA3AEB563V-Panasonic-datasheet-188913046.pdf?src-supplier=TME; ComponentLink13Description: https://datasheet.octopart.com:443/ERA3AEB563V-Panasonic-datasheet-188913046.pdf?src-supplier=TME; ComponentLink14URL: https://sigma.octopart.com:443/150570796/technical_drawing/Panasonic-ERA3AEB563V.pdf?src-supplier=Panasonic+SCT; ComponentLink14Description: https://sigma.octopart.com:443/150570796/technical_drawing/Panasonic-ERA3AEB563V.pdf?src-supplier=Panasonic+SCT; ComponentLink15URL: https://datasheet.octopart.com:443/ERA3AEB563V-Panasonic-datasheet-138783076.pdf?src-supplier=Burklin+Elektronik; ComponentLink15Description: https://datasheet.octopart.com:443/ERA3AEB563V-Panasonic-datasheet-138783076.pdf?src-supplier=Burklin+Elektronik; ComponentLink16URL: https://datasheet.octopart.com/ERA-3AEB563V-Panasonic-datasheet-78375410.pdf; ComponentLink16Description: https://datasheet.octopart.com/ERA-3AEB563V-Panasonic-datasheet-78375410.pdf; ComponentLink17URL: https://datasheet.octopart.com:443/ERA3AEB563V-Panasonic---ECG-datasheet-15994758.pdf?src-supplier=Farnell; ComponentLink17Description: https://datasheet.octopart.com:443/ERA3AEB563V-Panasonic---ECG-datasheet-15994758.pdf?src-supplier=Farnell; ComponentLink18URL: https://datasheet.octopart.com:443/ERA-3AEB563V-Panasonic-datasheet-33006989.pdf?src-supplier=Electro+Sonic; ComponentLink18Description: https://datasheet.octopart.com:443/ERA-3AEB563V-Panasonic-datasheet-33006989.pdf?src-supplier=Electro+Sonic; ComponentLink19URL: https://datasheet.octopart.com:443/ERA-3AEB563V-Panasonic-datasheet-34200419.pdf?src-supplier=Future+Electronics; ComponentLink19Description: https://datasheet.octopart.com:443/ERA-3AEB563V-Panasonic-datasheet-34200419.pdf?src-supplier=Future+Electronics; Supplier 1: DigiKey; Supplier Part Number 1: P56KDBCT-ND; Category: Chip SMD Resistors
footprint ERA-3AEB563V (RES SMD 56K OHM 0.1% 1/10W 0603)
pins: 1, 2